# Altium schematic symbol library C_22uF.SchLib: 1 symbol
Pins are listed as number, name and electrical type; pins without a type are passive.

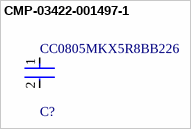
[diagram p0: symbol CMP-03422-001497-1]

## CMP-03422-001497-1
designator C?, comment CC0805MKX5R8BB226
CAP CER 22UF 25V X5R 0805; Tolerance: 20%; Max Operating Temperature: 85°C; Dielectric: X5R; Termination: SMD/SMT; Voltage Rating: 25V; Width: 0.049inch; Min Operating Temperature: -55°C; Case/Package: 0805; Lead Free: Lead Free; RoHS Compliant: Yes; Weight: 0.000194oz; Voltage Rating (DC): 25V; Capacitance: 22uF; Length: 0.079inch; Halogen Free: Halogen Free; Height: 1.25mm; Packaging: Tape and Reel; Package Quantity: 3000; Case Code (Metric): 2012; Thickness: 0.057inch; Case Code (Imperial): 0805; Mount: Surface Mount
footprint FP-CC0805-0_2-1_45-IPC_B
footprint FP-CC0805-0_2-1_45-MFG
footprint FP-CC0805-0_2-1_45-IPC_A
footprint FP-CC0805-0_2-1_45-IPC_C
pins: 1, 2